# Altium schematic symbol library HR961160C.SchLib: 1 symbol
Pins are listed as number, name and electrical type; pins without a type are passive.

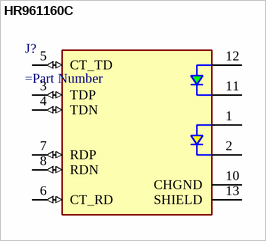
[diagram p0: symbol HR961160C]

## HR961160C
designator J?
pins: 1 YLW_A, 2 YLW_K, 3 TDP (io), 4 TDN (io), 5 CT_TD (io), 6 CT_RD (io), 7 RDP (io), 8 RDN (io), 10 CHGND (power), 11 GRN_K, 12 GRN_A, 13 SHIELD